# Altium footprint library FH12-18S-0P5SH55.PcbLib: 1 footprints
Each footprint in its own frame and in the unit in brackets; x right, y up, seen from the top. Pads: shape width x height; smd on the part's side, far side on the other; paste and mask are expansions set on the pad; w line width, h text height; cw(c..) or ccw(c..) is an arc to the next point about the centre after c.
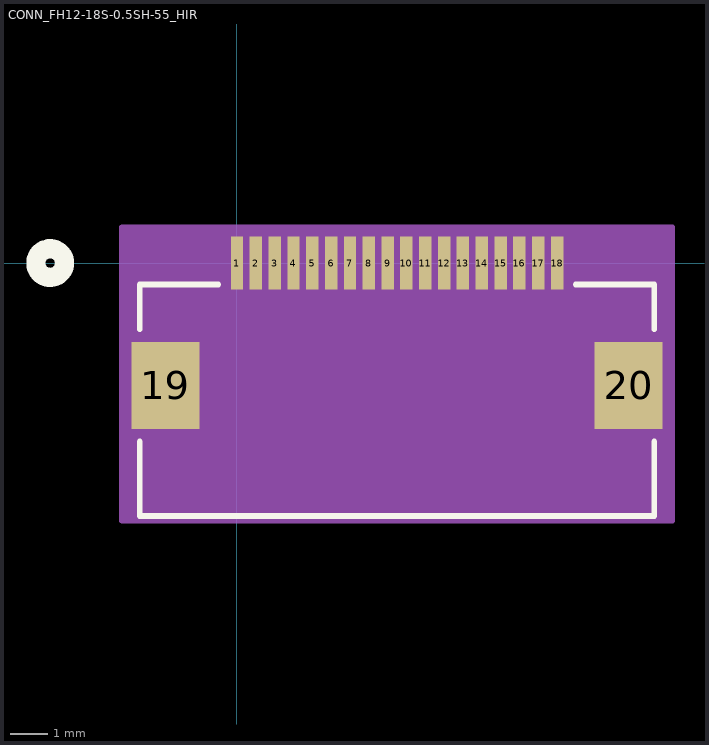
[diagram p0: the footprint, top view; thin cyan lines are the x and y axes]

## CONN_FH12-18S-0.5SH-55_HIR [mil]
pads (20):
  rect 13x55 smd paste+0 mask+0: 1(0,0) 2(19.68,0) 3(39.37,0) 4(59.06,0) 5(78.74,0) 6(98.43,0) 7(118.11,0) 8(137.8,0) 9(157.48,0) 10(177.17,0) 11(196.85,0) 12(216.54,0) 13(236.22,0) 14(255.91,0) 15(275.59,0) 16(295.28,0) 17(314.96,0) 18(334.65,0)
  rect 71x91 smd paste+0 mask+0: 19(-74.8,-127.95) 20(409.45,-127.95)
Top Overlay:
  circle w20: c-195.3,0 r15
  lines w6: -101.68,-186.55 -101.68,-264.5 436.32,-264.5 436.32,-186.55 ; -101.68,-69.35 -101.68,-22.5 -19.6,-22.5 ; 354.25,-22.5 436.32,-22.5 436.32,-69.35
  text ".Designator" at 29.82,-25 h50
Bottom Overlay:
  circle w20: c-195.3,0 r15
Mechanical 13:
  circle w20: c0,0 r15
  lines w1: -96.68,-259.5 431.32,-259.5 431.32,-27.5 -96.68,-27.5 -96.68,-259.5
  text ".Designator" at 29.82,-25 h50
Mechanical 15:
  region: 454.95,37.5 -120.3,37.5 -120.3,-269.5 454.95,-269.5
  lines w6: -120.3,-269.5 -120.3,37.5 454.95,37.5 454.95,-269.5 -120.3,-269.5